# Altium footprint library CHIP-Library.PcbLib: 345 footprints (part 7 of 22)
Each footprint in its own frame and in the unit in brackets; x right, y up, seen from the top. Pads: shape width x height; smd on the part's side, far side on the other; paste and mask are expansions set on the pad; w line width, h text height; cw(c..) or ccw(c..) is an arc to the next point about the centre after c.
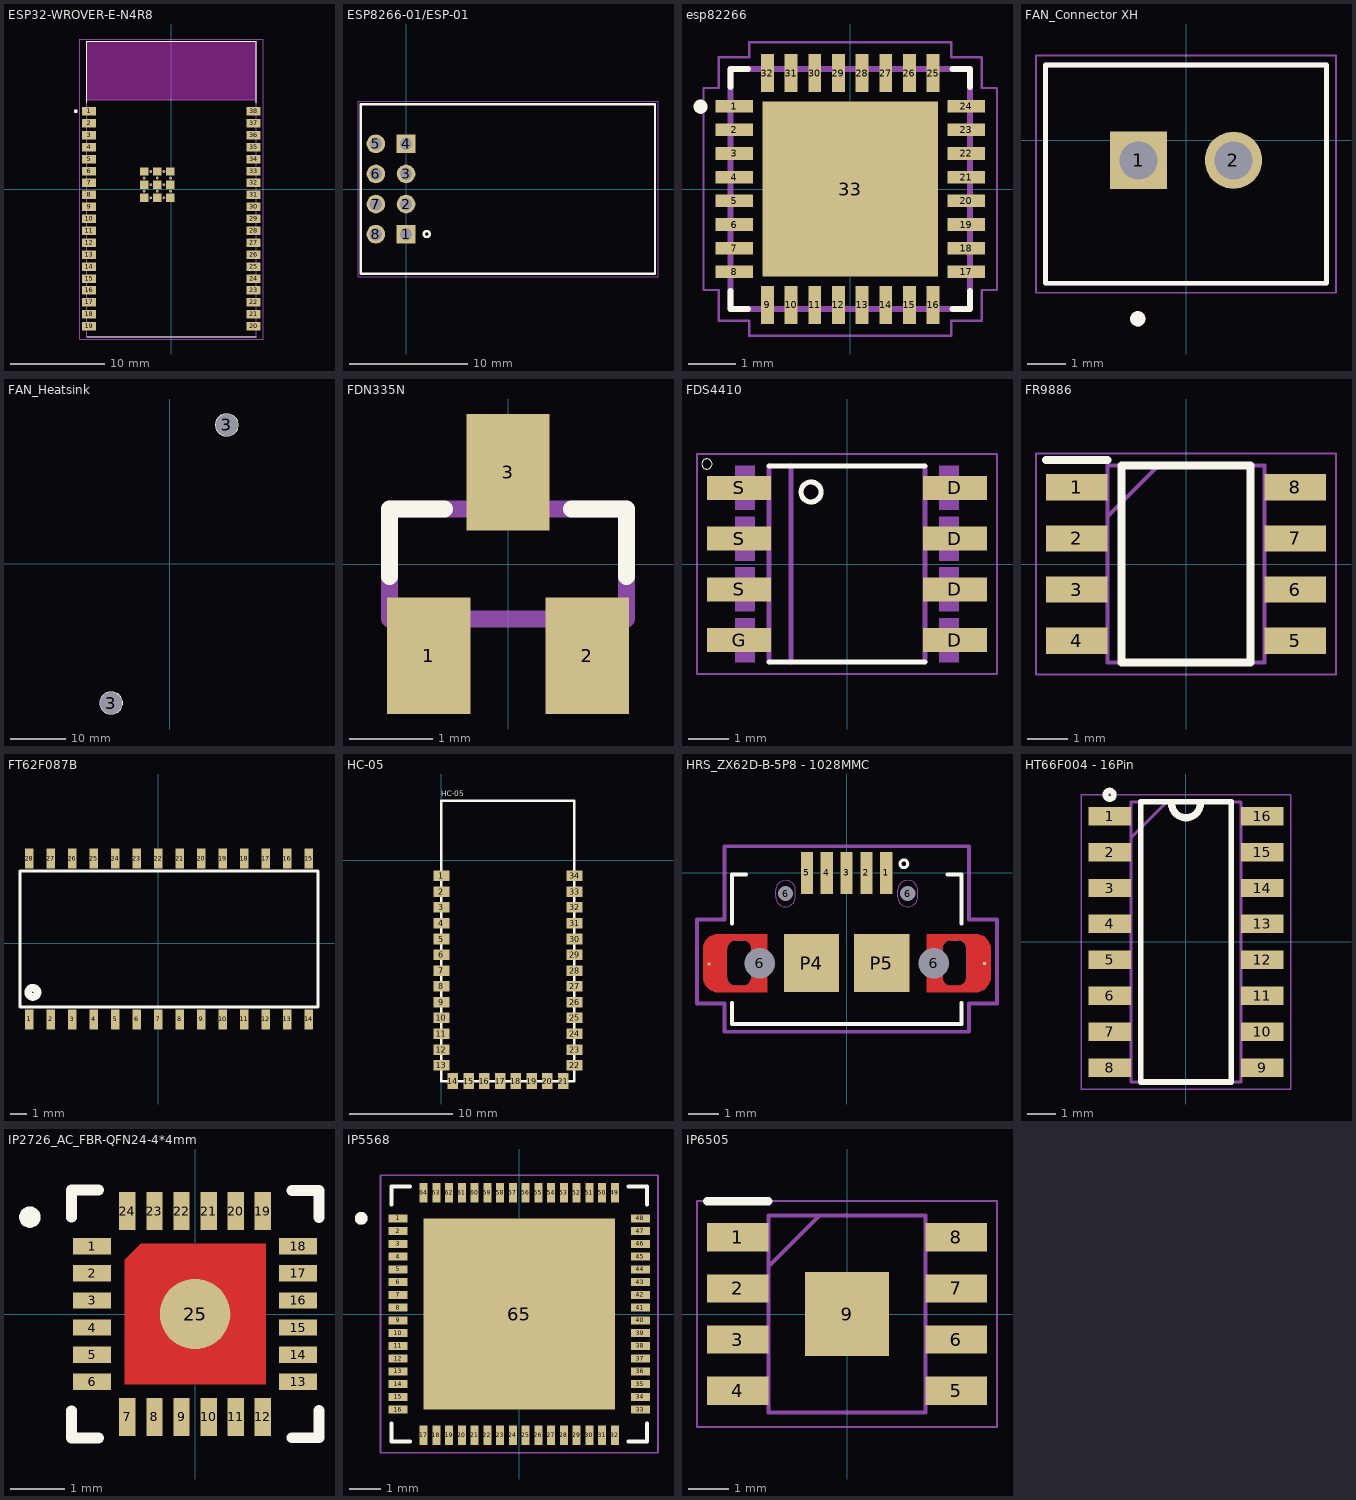
[diagram p6: the footprints below, top view; thin cyan lines are the x and y axes]

## ESP32-WROVER-E [mm]

## ESP32-WROVER-E-N4R8 [mm]
height 3.45
pads (59):
  rect 1.5x0.9 smd: 1(-8.75,8.26) 2(-8.75,6.99) 3(-8.75,5.72) 4(-8.75,4.45) 5(-8.75,3.18) 6(-8.75,1.91) 7(-8.75,0.64) 8(-8.75,-0.63) 9(-8.75,-1.9) 10(-8.75,-3.17) 11(-8.75,-4.44) 12(-8.75,-5.71) 13(-8.75,-6.98) 14(-8.75,-8.25) 15(-8.75,-9.52) 16(-8.75,-10.79) 17(-8.75,-12.06) 18(-8.75,-13.33) 19(-8.75,-14.6) 20(8.75,-14.6) 21(8.75,-13.33) 22(8.75,-12.06) 23(8.75,-10.79) 24(8.75,-9.52) 25(8.75,-8.25) 26(8.75,-6.98) 27(8.75,-5.71) 28(8.75,-4.44) 29(8.75,-3.17) 30(8.75,-1.9) 31(8.75,-0.63) 32(8.75,0.64) 33(8.75,1.91) 34(8.75,3.18) 35(8.75,4.45) 36(8.75,5.72) 37(8.75,6.99) 38(8.75,8.26)
  rect 0.9x0.9 smd: 39_1(-2.9,1.86) 39_2(-1.5,1.86) 39_3(-0.1,1.86) 39_4(-2.9,0.46) 39_5(-1.5,0.46) 39_6(-0.1,0.46) 39_7(-2.9,-0.94) 39_8(-1.5,-0.94) 39_9(-0.1,-0.94)
  round 0.3 hole 0.2 mask+0: 40(-2.2,1.86) 41(-0.8,1.86) 42(-2.9,1.16) 43(-1.5,1.16) 44(-0.1,1.16) 45(-2.2,0.46) 46(-0.8,0.46) 47(-2.9,-0.24) 48(-1.5,-0.24) 49(-0.1,-0.24) 50(-2.2,-0.94) 51(-0.8,-0.94)
Top Overlay:
  circle w0.2: c-10.16,8.26 r0.1
  lines w0.127: -9,-15.7 9,-15.7 ; -9,9.15 -9,15.7 9,15.7 9,9.15
Keep-Out Layer:
  region: 9,9.48 -9,9.48 -9,15.7 9,15.7
Mechanical 13:
  circle w0.2: c-10.16,8.26 r0.1
  lines w0.127: -9,9.48 9,9.48 ; -9,9.48 -9,-15.7 9,-15.7 9,9.48 ; -9,9.48 -9,15.7 9,15.7 9,9.48
Mechanical 15:
  lines w0.05: -9.75,-15.95 -9.75,15.95 9.75,15.95 9.75,-15.95 -9.75,-15.95
3D body "ESP32-WROVER-E (8MB).STEP": height 3.45, standoff 0, extent -9,-15.7 9,15.7

## ESP8266-01/ESP-01 [mm]
pads (8):
  rect 1.575x1.575 hole 1.05: 1(0,-3.81) 4(0,3.81)
  round 1.575 hole 1.05: 2(0,-1.27) 3(0,1.27) 5(-2.54,3.81) 6(-2.54,1.27) 7(-2.54,-1.27) 8(-2.54,-3.81)
Top Overlay:
  circle w0.2: c1.75,-3.8 r0.25
  lines w0.2: -3.81,-7.15 -3.81,7.15 21,7.15 21,-7.15 -3.81,-7.15
Mechanical 15:
  lines w0.05: -4.05,-7.4 -4.05,7.4 21.25,7.4 21.25,-7.4 -4.05,-7.4
3D body "User Library-ESP8266 ESP-01.step": height 5.89, standoff -5.79, extent -3.937,-7.25 20.863,7.25

## esp82266 [mm]
pads (33):
  rect 0.8x0.27 smd: 1(-2.45,1.75) 2(-2.45,1.25) 3(-2.45,0.75) 4(-2.45,0.25) 5(-2.45,-0.25) 6(-2.45,-0.75) 7(-2.45,-1.25) 8(-2.45,-1.75) 17(2.45,-1.75) 18(2.45,-1.25) 19(2.45,-0.75) 20(2.45,-0.25) 21(2.45,0.25) 22(2.45,0.75) 23(2.45,1.25) 24(2.45,1.75)
  rect 0.27x0.8 smd: 9(-1.75,-2.45) 10(-1.25,-2.45) 11(-0.75,-2.45) 12(-0.25,-2.45) 13(0.25,-2.45) 14(0.75,-2.45) 15(1.25,-2.45) 16(1.75,-2.45) 25(1.75,2.45) 26(1.25,2.45) 27(0.75,2.45) 28(0.25,2.45) 29(-0.25,2.45) 30(-0.75,2.45) 31(-1.25,2.45) 32(-1.75,2.45)
  rect 3.7x3.7 smd: 33(0,0)
Top Overlay:
  circle w0.15: c-3.163,1.739 r0.075
  lines w0.127: -2.53,-2.156 -2.53,-2.53 -2.156,-2.53 ; -2.53,2.156 -2.53,2.53 -2.156,2.53 ; 2.156,-2.53 2.53,-2.53 2.53,-2.156 ; 2.156,2.53 2.53,2.53 2.53,2.156
Top Paste:
  region: -1.172,1.17 1.17,1.17 1.17,-1.172 -1.172,-1.172
Mechanical 4:
  lines w0.127: -2.53,-2.53 2.53,-2.53 ; -2.53,-2.53 -2.53,2.53 ; -2.53,-2.53 2.53,-2.53 ; -2.53,-2.53 -2.53,2.53 ; -2.53,2.53 2.53,2.53 ; -2.53,2.53 2.53,2.53 ; 2.53,-2.53 2.53,2.53 ; 2.53,-2.53 2.53,2.53
Mechanical 16:
  lines w0.05: -3.1,-2.135 -3.1,2.135 -2.78,2.135 -2.78,2.78 -2.135,2.78 -2.135,3.1 2.135,3.1 2.135,2.78 2.78,2.78 2.78,2.135 3.1,2.135 3.1,-2.135 2.78,-2.135 2.78,-2.78 2.135,-2.78 2.135,-3.1 -2.135,-3.1 -2.135,-2.78 -2.78,-2.78 -2.78,-2.135 -3.1,-2.135
3D body "User Library-QFN-32UH.step": height 0.75, standoff 0, extent -2.51,-2.51 2.51,2.51

## FAN_Connector XH [mm] "FAN_Connector XH 2.54mm"
pads (2):
  rect 1.508x1.508 hole 1: 1(-1.25,-0.525)
  round 1.508 hole 1: 2(1.25,-0.525)
Top Overlay:
  circle w0.2: c-1.27,-4.699 r0.1
  lines w0.127: -3.7,-3.764 -3.7,1.986 3.7,1.986 3.7,-3.764 -3.7,-3.764
Mechanical 13:
  circle w0.2: c-1.27,-4.699 r0.1
  lines w0.127: -3.7,-3.764 -3.7,1.986 3.7,1.986 3.7,-3.764 -3.7,-3.764
Mechanical 15:
  lines w0.05: -3.95,-4.014 -3.95,2.236 3.95,2.236 3.95,-4.014 -3.95,-4.014
3D body "User Library-CONN, HDR, 2_5mm X 2.step": height 7.12, standoff -3.8, extent -3.708,-3.886 3.683,1.854

## FAN_Heatsink [mm] "55mm Aluminum Heatsink with Cooling Fan"
pads (2):
  round 4 hole 4: 3(-10.668,-25.4) 3(10.414,25.273)
Top Overlay:
  circle w0.254: c10.414,25.273 r2
  circle w0.254: c-10.668,-25.4 r2
3D body "55mm-heatsink.STEP": height 22.15, standoff -0.35, extent -27.504,-28.406 27.496,28.417

## FDN335N [mm]
pads (3):
  rect 1x1.4 smd: 1(-0.95,-1.1) 2(0.95,-1.1) 3(0,1.1)
Top Overlay:
  lines w0.203: -1.422,-0.152 -1.422,0.66 -0.764,0.66 ; 0.764,0.66 1.422,0.66 1.422,-0.152
Mechanical 4:
  region: -1.169,-0.711 -0.711,-0.711 -0.711,-1.296 -1.169,-1.296
  region: 0.712,-0.711 1.168,-0.711 1.168,-1.296 0.712,-1.296
  region: -0.229,1.295 0.229,1.295 0.229,0.712 -0.229,0.712
  region: -1.169,-0.711 -0.711,-0.711 -0.711,-1.296 -1.169,-1.296
  region: 0.712,-0.711 1.168,-0.711 1.168,-1.296 0.712,-1.296
  region: -0.229,1.295 0.229,1.295 0.229,0.712 -0.229,0.712
  lines w0.203: -1.422,-0.66 -1.422,0.66 ; -1.422,-0.66 1.422,-0.66 ; -1.422,-0.66 -1.422,0.66 ; -1.422,-0.66 1.422,-0.66 ; -1.422,0.66 1.422,0.66 ; -1.422,0.66 1.422,0.66 ; 1.422,-0.66 1.422,0.66 ; 1.422,-0.66 1.422,0.66
3D body "CircuitWorks-SOT-23.step": height 1.11, standoff 0.01, extent -1.5,-1.25 1.5,1.25

## FDS4410 [mm]
pads (8):
  rect 1.6x0.6 smd: D(2.7,-1.905) D(2.7,-0.635) D(2.7,0.635) D(2.7,1.905) G(-2.7,-1.905) S(-2.7,-0.635) S(-2.7,0.635) S(-2.7,1.905)
Top Overlay:
  circle w0.127: c-0.9,1.8 r0.25
  circle w0: c-3.5,2.5 r0.127
  lines w0.127: -1.95,-2.45 1.95,-2.45 ; -1.95,2.45 1.95,2.45
Mechanical 4:
  region: 2.306,2.455 2.795,2.455 2.795,1.355 2.306,1.355
  region: 2.306,1.185 2.795,1.185 2.795,0.085 2.306,0.085
  region: 2.308,-0.085 2.795,-0.085 2.795,-1.187 2.308,-1.187
  region: 2.309,-1.355 2.795,-1.355 2.795,-2.459 2.309,-2.459
  region: -2.795,-1.355 -2.305,-1.355 -2.305,-2.455 -2.795,-2.455
  region: -2.796,-0.085 -2.305,-0.085 -2.305,-1.185 -2.796,-1.185
  region: -2.797,1.185 -2.305,1.185 -2.305,0.085 -2.797,0.085
  region: -2.8,2.455 -2.305,2.455 -2.305,1.357 -2.8,1.357
  region: 2.306,2.455 2.795,2.455 2.795,1.355 2.306,1.355
  region: 2.306,1.185 2.795,1.185 2.795,0.085 2.306,0.085
  region: 2.308,-0.085 2.795,-0.085 2.795,-1.187 2.308,-1.187
  region: 2.309,-1.355 2.795,-1.355 2.795,-2.459 2.309,-2.459
  region: -2.795,-1.355 -2.305,-1.355 -2.305,-2.455 -2.795,-2.455
  region: -2.796,-0.085 -2.305,-0.085 -2.305,-1.185 -2.796,-1.185
  region: -2.797,1.185 -2.305,1.185 -2.305,0.085 -2.797,0.085
  region: -2.8,2.455 -2.305,2.455 -2.305,1.357 -2.8,1.357
  lines w0.127: -1.95,-2.45 -1.95,2.45 -1.95,-2.45 ; -1.4,-2.45 -1.4,2.45 -1.4,-2.45 ; 1.95,-2.45 1.95,2.45 1.95,-2.45
Mechanical 16:
  lines w0.05: -3.75,-2.75 -3.75,2.75 3.75,2.75 3.75,-2.75 -3.75,-2.75
3D body "KF33BD.step": height 1.45, standoff 0, extent -2.857,-2.451 2.921,2.451

## FR9886 [mm]
pads (8):
  rect 1.525x0.65 smd: 1(-2.712,1.905) 2(-2.712,0.635) 3(-2.712,-0.635) 4(-2.712,-1.905) 5(2.712,-1.905) 6(2.712,-0.635) 7(2.712,0.635) 8(2.712,1.905)
Top Overlay:
  lines w0.2: -3.475,2.58 -1.95,2.58 ; -1.6,-2.45 1.6,-2.45 1.6,2.45 -1.6,2.45 -1.6,-2.45
Mechanical 13:
  lines w0.1: -1.95,1.18 -0.68,2.45 ; -1.95,-2.45 1.95,-2.45 1.95,2.45 -1.95,2.45 -1.95,-2.45
Mechanical 15:
  lines w0.05: -3.725,-2.75 3.725,-2.75 3.725,2.75 -3.725,2.75 -3.725,-2.75
3D body "FR9886SOGTR.stp": height 1.75, standoff 0, extent -3,-2.45 3,2.45

## FT62F087B [mm] "SOP-28"
pads (28):
  rect 0.5x1.2 smd: 1(-7.62,-4.5) 2(-6.35,-4.5) 3(-5.08,-4.5) 4(-3.81,-4.5) 5(-2.54,-4.5) 6(-1.27,-4.5) 7(0,-4.5) 8(1.27,-4.5) 9(2.54,-4.5) 10(3.81,-4.5) 11(5.08,-4.5) 12(6.35,-4.5) 13(7.62,-4.5) 14(8.89,-4.5) 15(8.89,5) 16(7.62,5) 17(6.35,5) 18(5.08,5) 19(3.81,5) 20(2.54,5) 21(1.27,5) 22(0,5) 23(-1.27,5) 24(-2.54,5) 25(-3.81,5) 26(-5.08,5) 27(-6.35,5) 28(-7.62,5)
Top Overlay:
  circle w0.2: c-7.4,-2.9 r0.4
  circle w0.3: c-7.4,-2.9 r0.2
  lines w0.178: -8.16,-3.75 -8.16,4.25 9.43,4.25 9.43,-3.75 -8.16,-3.75

## HC-05 [mil] "Bluetooth module"
pads (34):
  rect 60x40 smd: 1(0,-60) 2(0,-120) 3(0,-180) 4(0,-240) 5(0,-300) 6(0,-360) 7(0,-420) 8(0,-480) 9(0,-540) 10(0,-600) 11(0,-660) 12(0,-720) 13(0,-780) 22(506,-780) 23(506,-720) 24(506,-660) 25(506,-600) 26(506,-540) 27(506,-480) 28(506,-420) 29(506,-360) 30(506,-300) 31(506,-240) 32(506,-180) 33(506,-120) 34(506,-60)
  rect 40x60 smd: 14(43,-840) 15(103,-840) 16(163,-840) 17(223,-840) 18(283,-840) 19(343,-840) 20(403,-840) 21(463,-840)
Top Overlay:
  lines w10: 0,-840 0,225 505,225 505,-840 0,-840
  text "HC-05" at 0,235 h35

## HRS_ZX62D-B-5P8 - 1028MMC [mm]
pads (13):
  rect 0.4x1.372 smd: 1(1.3,0) 2(0.65,0) 3(0,0) 4(-0.65,0) 5(-1.3,0)
  round 0.61 hole 1: 6(-2.85,-2.95) 6(2.85,-2.95)
  round 0.406 hole 0.5: 6(-2,-0.675) 6(2,-0.675)
  rect 0.102x0.102 smd: P3(-4.513,-2.987) P6(4.521,-2.963)
  rect 1.803x1.905 smd: P4(-1.15,-2.95) P5(1.15,-2.95)
Top Layer:
  region: -2.6,-2 -4.2,-2 -4.299,-2 -4.483,-2.076 -4.624,-2.217 -4.7,-2.401 -4.7,-2.5 -4.7,-2.95 -3.925,-2.95 -3.925,-2.5 -3.919,-2.441 -3.874,-2.333 -3.792,-2.251 -3.684,-2.206 -3.625,-2.2 -3.4,-2.2 -3.341,-2.206 -3.233,-2.251 -3.151,-2.333 -3.106,-2.441 -3.1,-2.5 -3.1,-2.95 -2.6,-2.95
  region: 2.616,-3.9 4.216,-3.9 4.317,-3.901 4.503,-3.826 4.645,-3.685 4.724,-3.5 4.724,-3.4 4.724,-2.95 3.937,-2.95 3.937,-3.4 3.931,-3.459 3.885,-3.568 3.801,-3.65 3.691,-3.695 3.632,-3.7 3.404,-3.7 3.347,-3.692 3.244,-3.645 3.167,-3.563 3.128,-3.457 3.124,-3.4 3.124,-2.95 2.616,-2.95
  region: -3.1,-2.95 -2.6,-2.95 -2.6,-3.9 -4.2,-3.9 -4.299,-3.9 -4.483,-3.824 -4.624,-3.683 -4.7,-3.499 -4.7,-3.4 -4.7,-2.95 -3.925,-2.95 -3.925,-3.425 -3.92,-3.479 -3.879,-3.578 -3.803,-3.654 -3.704,-3.695 -3.65,-3.7 -3.4,-3.7 -3.341,-3.694 -3.233,-3.649 -3.151,-3.567 -3.106,-3.459 -3.1,-3.4
  region: 3.124,-2.95 2.616,-2.95 2.616,-2 4.216,-2 4.317,-1.999 4.503,-2.074 4.645,-2.215 4.724,-2.4 4.724,-2.5 4.724,-2.95 3.937,-2.95 3.937,-2.475 3.931,-2.421 3.889,-2.321 3.812,-2.245 3.712,-2.205 3.658,-2.2 3.404,-2.2 3.347,-2.208 3.244,-2.255 3.167,-2.337 3.128,-2.443 3.124,-2.5
Top Overlay:
  circle w0.1: c1.875,0.3 r0.127
  lines w0.127: -3.75,-4.25 -3.75,-4.95 3.759,-4.95 3.759,-4.25 ; -3.75,-1.65 -3.75,-0.046 -3.3,-0.046 ; 3.302,-0.046 3.759,-0.046 3.759,-1.65
Top Paste:
  region: -2.6,-2 -4.2,-2 -4.299,-2 -4.483,-2.076 -4.624,-2.217 -4.7,-2.401 -4.7,-2.5 -4.7,-2.95 -3.925,-2.95 -3.925,-2.5 -3.919,-2.441 -3.874,-2.333 -3.792,-2.251 -3.684,-2.206 -3.625,-2.2 -3.4,-2.2 -3.341,-2.206 -3.233,-2.251 -3.151,-2.333 -3.106,-2.441 -3.1,-2.5 -3.1,-2.95 -2.6,-2.95
  region: 2.616,-3.9 4.216,-3.9 4.317,-3.901 4.503,-3.826 4.645,-3.685 4.724,-3.5 4.724,-3.4 4.724,-2.95 3.937,-2.95 3.937,-3.4 3.931,-3.459 3.885,-3.568 3.801,-3.65 3.691,-3.695 3.632,-3.7 3.404,-3.7 3.347,-3.692 3.244,-3.645 3.167,-3.563 3.128,-3.457 3.124,-3.4 3.124,-2.95 2.616,-2.95
  region: -3.1,-2.95 -2.6,-2.95 -2.6,-3.9 -4.2,-3.9 -4.299,-3.9 -4.483,-3.824 -4.624,-3.683 -4.7,-3.499 -4.7,-3.4 -4.7,-2.95 -3.925,-2.95 -3.925,-3.425 -3.92,-3.479 -3.879,-3.578 -3.803,-3.654 -3.704,-3.695 -3.65,-3.7 -3.4,-3.7 -3.341,-3.694 -3.233,-3.649 -3.151,-3.567 -3.106,-3.459 -3.1,-3.4
  region: 3.124,-2.95 2.616,-2.95 2.616,-2 4.216,-2 4.317,-1.999 4.503,-2.074 4.645,-2.215 4.724,-2.4 4.724,-2.5 4.724,-2.95 3.937,-2.95 3.937,-2.475 3.931,-2.421 3.889,-2.321 3.812,-2.245 3.712,-2.205 3.658,-2.2 3.404,-2.2 3.347,-2.208 3.244,-2.255 3.167,-2.337 3.128,-2.443 3.124,-2.5
Top Solder:
  rectangle: -4.8,-4 -2.5,-1.9
  rectangle: 2.515,-4.001 4.801,-1.9
Mechanical 4:
Mechanical 11:
  lines w0.025: -3.925,-3.4 ccw(c-3.625,-3.4) -3.625,-3.7 -3.4,-3.7 ccw(c-3.4,-3.4) -3.1,-3.4 -3.1,-2.5 ccw(c-3.4,-2.5) -3.4,-2.2 -3.625,-2.2 ccw(c-3.625,-2.5) -3.925,-2.5 -3.925,-3.4 ; -2.325,-0.777 ccw(c-1.998,-0.778) -2,-1.105 ccw(c-2.002,-0.778) -1.675,-0.777 -1.675,-0.573 ccw(c-2.003,-0.571) -2,-0.243 ccw(c-1.997,-0.571) -2.325,-0.573 -2.325,-0.777 ; 1.67,-0.777 ccw(c1.999,-0.776) 2,-1.105 ccw(c2.001,-0.776) 2.33,-0.777 2.33,-0.573 ccw(c2,-0.573) 2,-0.243 ccw(c2,-0.573) 1.67,-0.573 1.67,-0.777 ; 3.124,-3.4 ccw(c3.414,-3.41) 3.404,-3.7 3.632,-3.7 ccw(c3.635,-3.398) 3.937,-3.4 3.937,-2.5 ccw(c3.635,-2.502) 3.632,-2.2 3.404,-2.2 ccw(c3.414,-2.49) 3.124,-2.5 3.124,-3.4
Mechanical 27:
  lines w0.127: -4.9,-4.275 -4.9,-1.525 -4,-1.525 -4,0.875 4.013,0.875 4.013,-1.525 4.925,-1.525 4.925,-4.275 4.013,-4.275 4.013,-5.2 -4,-5.2 -4,-4.275 -4.9,-4.275

## HT66F004 - 16Pin [mm] "NSOP-16"
height 22
pads (16):
  rect 1.5x0.65 smd: 1(-2.7,4.445) 2(-2.7,3.175) 3(-2.7,1.905) 4(-2.7,0.635) 5(-2.7,-0.635) 6(-2.7,-1.905) 7(-2.7,-3.175) 8(-2.7,-4.445) 9(2.7,-4.445) 10(2.7,-3.175) 11(2.7,-1.905) 12(2.7,-0.635) 13(2.7,0.635) 14(2.7,1.905) 15(2.7,3.175) 16(2.7,4.445)
Top Overlay:
  circle w0.2: c-2.7,5.2 r0.15
  lines w0.2: -1.6,-4.95 1.6,-4.95 1.6,4.95 -1.6,4.95 -1.6,-4.95
  lines w0.254: -0.508,4.897 ccw(c0,4.897) 0.508,4.897
Mechanical 13:
  lines w0.1: -1.95,3.68 -0.68,4.95 ; -1.95,-4.95 1.95,-4.95 1.95,4.95 -1.95,4.95 -1.95,-4.95
Mechanical 15:
  lines w0.05: -3.7,-5.2 3.7,-5.2 3.7,5.2 -3.7,5.2 -3.7,-5.2
3D body "BS816A-1.stp": height 1.75, standoff 0, extent -3,-4.95 3,4.95

## IP2726_AC_FBR-QFN24-4*4mm [mm]
pads (26):
  rect 0.7x0.3 smd mask+0.03: 1(-1.9,1.25) 2(-1.9,0.75) 3(-1.9,0.25) 4(-1.9,-0.25) 5(-1.9,-0.75) 6(-1.9,-1.25) 13(1.9,-1.25) 14(1.9,-0.75) 15(1.9,-0.25) 16(1.9,0.25) 17(1.9,0.75) 18(1.9,1.25)
  rect 0.3x0.7 smd mask+0.03: 7(-1.25,-1.9) 8(-0.75,-1.9) 9(-0.25,-1.9) 10(0.25,-1.9) 11(0.75,-1.9) 12(1.25,-1.9) 19(1.25,1.9) 20(0.75,1.9) 21(0.25,1.9) 22(-0.25,1.9) 23(-0.75,1.9) 24(-1.25,1.9)
  round 1.3 smd paste-2: 25(0,0)
  round 0.4 on Top Overlay: ""(-3.048,1.786)
Top Layer:
  region: -1,1.3 -1.3,1 -1.3,-1.3 1.3,-1.3 1.3,1.3
Top Overlay:
  lines w0.2: -2.282,-1.786 -2.282,-2.286 -1.782,-2.286 ; -2.282,1.786 -2.282,2.286 -1.782,2.286 ; 1.786,-2.282 2.286,-2.282 2.286,-1.782 ; 1.786,2.278 2.286,2.278 2.286,1.778
Top Paste:
  rectangle: -0.975,-0.95 -0.225,-0.25
  rectangle: -0.975,0.25 -0.225,0.95
  rectangle: 0.225,0.225 0.975,0.975
  rectangle: 0.225,-0.95 0.975,-0.25
3D body: height 0.75, standoff 0, extent -2,-2.05 2,2.05

## IP5568 [mm]
pads (65):
  rect 0.6x0.25 smd: 1(-3.8,3) 2(-3.8,2.6) 3(-3.8,2.2) 4(-3.8,1.8) 5(-3.8,1.4) 6(-3.8,1) 7(-3.8,0.6) 8(-3.8,0.2) 9(-3.8,-0.2) 10(-3.8,-0.6) 11(-3.8,-1) 12(-3.8,-1.4) 13(-3.8,-1.8) 14(-3.8,-2.2) 15(-3.8,-2.6) 16(-3.8,-3) 33(3.8,-3) 34(3.8,-2.6) 35(3.8,-2.2) 36(3.8,-1.8) 37(3.8,-1.4) 38(3.8,-1) 39(3.8,-0.6) 40(3.8,-0.2) 41(3.8,0.2) 42(3.8,0.6) 43(3.8,1) 44(3.8,1.4) 45(3.8,1.8) 46(3.8,2.2) 47(3.8,2.6) 48(3.8,3)
  rect 0.25x0.6 smd: 17(-3,-3.8) 18(-2.6,-3.8) 19(-2.2,-3.8) 20(-1.8,-3.8) 21(-1.4,-3.8) 22(-1,-3.8) 23(-0.6,-3.8) 24(-0.2,-3.8) 25(0.2,-3.8) 26(0.6,-3.8) 27(1,-3.8) 28(1.4,-3.8) 29(1.8,-3.8) 30(2.2,-3.8) 31(2.6,-3.8) 32(3,-3.8) 49(3,3.8) 50(2.6,3.8) 51(2.2,3.8) 52(1.8,3.8) 53(1.4,3.8) 54(1,3.8) 55(0.6,3.8) 56(0.2,3.8) 57(-0.2,3.8) 58(-0.6,3.8) 59(-1,3.8) 60(-1.4,3.8) 61(-1.8,3.8) 62(-2.2,3.8) 63(-2.6,3.8) 64(-3,3.8)
  rect 6x6 smd paste-2.535: 65(0,0)
Top Overlay:
  circle w0.2: c-4.955,3 r0.1
  lines w0.127: -4,-3.43 -4,-4 -3.43,-4 ; -4,3.43 -4,4 -3.43,4 ; 3.43,-4 4,-4 4,-3.43 ; 3.43,4 4,4 4,3.43
Top Paste:
  region: -1.795,-2.725 -2.725,-2.725 -2.725,-1.795 -1.795,-1.795
  region: -0.665,-2.725 -1.595,-2.725 -1.595,-1.795 -0.665,-1.795
  region: 1.595,-2.725 0.665,-2.725 0.665,-1.795 1.595,-1.795
  region: 2.725,-2.725 1.795,-2.725 1.795,-1.795 2.725,-1.795
  region: 2.725,-1.595 1.795,-1.595 1.795,-0.665 2.725,-0.665
  region: 1.595,-1.595 0.665,-1.595 0.665,-0.665 1.595,-0.665
  region: -1.795,-1.595 -2.725,-1.595 -2.725,-0.665 -1.795,-0.665
  region: -0.665,-1.595 -1.595,-1.595 -1.595,-0.665 -0.665,-0.665
  region: 0.465,-1.595 -0.465,-1.595 -0.465,-0.665 0.465,-0.665
  region: 0.465,-2.725 -0.465,-2.725 -0.465,-1.795 0.465,-1.795
  region: 2.725,-0.465 1.795,-0.465 1.795,0.465 2.725,0.465
  region: 1.595,-0.465 0.665,-0.465 0.665,0.465 1.595,0.465
  region: -0.665,-0.465 -1.595,-0.465 -1.595,0.465 -0.665,0.465
  region: -1.795,-0.465 -2.725,-0.465 -2.725,0.465 -1.795,0.465
  region: -1.795,0.665 -2.725,0.665 -2.725,1.595 -1.795,1.595
  region: -0.665,0.665 -1.595,0.665 -1.595,1.595 -0.665,1.595
  region: 1.595,0.665 0.665,0.665 0.665,1.595 1.595,1.595
  region: 2.725,0.665 1.795,0.665 1.795,1.595 2.725,1.595
  region: 2.725,1.795 1.795,1.795 1.795,2.725 2.725,2.725
  region: 1.595,1.795 0.665,1.795 0.665,2.725 1.595,2.725
  region: -1.795,1.795 -2.725,1.795 -2.725,2.725 -1.795,2.725
  region: -0.665,1.795 -1.595,1.795 -1.595,2.725 -0.665,2.725
  region: 0.465,1.795 -0.465,1.795 -0.465,2.725 0.465,2.725
  region: 0.465,0.665 -0.465,0.665 -0.465,1.595 0.465,1.595
Top Courtyard:
  lines w0.05: -4.35,-4.35 -4.35,4.35 4.35,4.35 4.35,-4.35 -4.35,-4.35
Mechanical 13:
  circle w0.2: c-4.955,3 r0.1
Mechanical 15:
  lines w0.05: -4.35,-4.35 -4.35,4.35 4.35,4.35 4.35,-4.35 -4.35,-4.35
3D body "step_temp.STEP": height 0.9, standoff 0, extent -4,-4 4,4

## IP6505 [mm]
pads (9):
  rect 1.525x0.7 smd: 1(-2.712,1.905) 2(-2.712,0.635) 3(-2.712,-0.635) 4(-2.712,-1.905) 5(2.712,-1.905) 6(2.712,-0.635) 7(2.712,0.635) 8(2.712,1.905)
  rect 2.09x2.09 smd: 9(0,0)
Top Overlay:
  lines w0.2: -3.475,2.8 -1.95,2.8
Mechanical 3:
  lines w0.05: -3.725,-2.8 -3.725,2.8 3.725,2.8 3.725,-2.8 -3.725,-2.8
  lines w0.1: -1.95,1.18 -0.68,2.45 ; -1.95,-2.45 -1.95,2.45 1.95,2.45 1.95,-2.45 -1.95,-2.45
3D body "IP6505.stp": height 1.65, standoff 0, extent -3,-2.45 3,2.45